# Altium footprint library PcbLib.PcbLib: 31 footprints (part 2 of 2)
Each footprint in its own frame and in the unit in brackets; x right, y up, seen from the top. Pads: shape width x height; smd on the part's side, far side on the other; paste and mask are expansions set on the pad; w line width, h text height; cw(c..) or ccw(c..) is an arc to the next point about the centre after c.
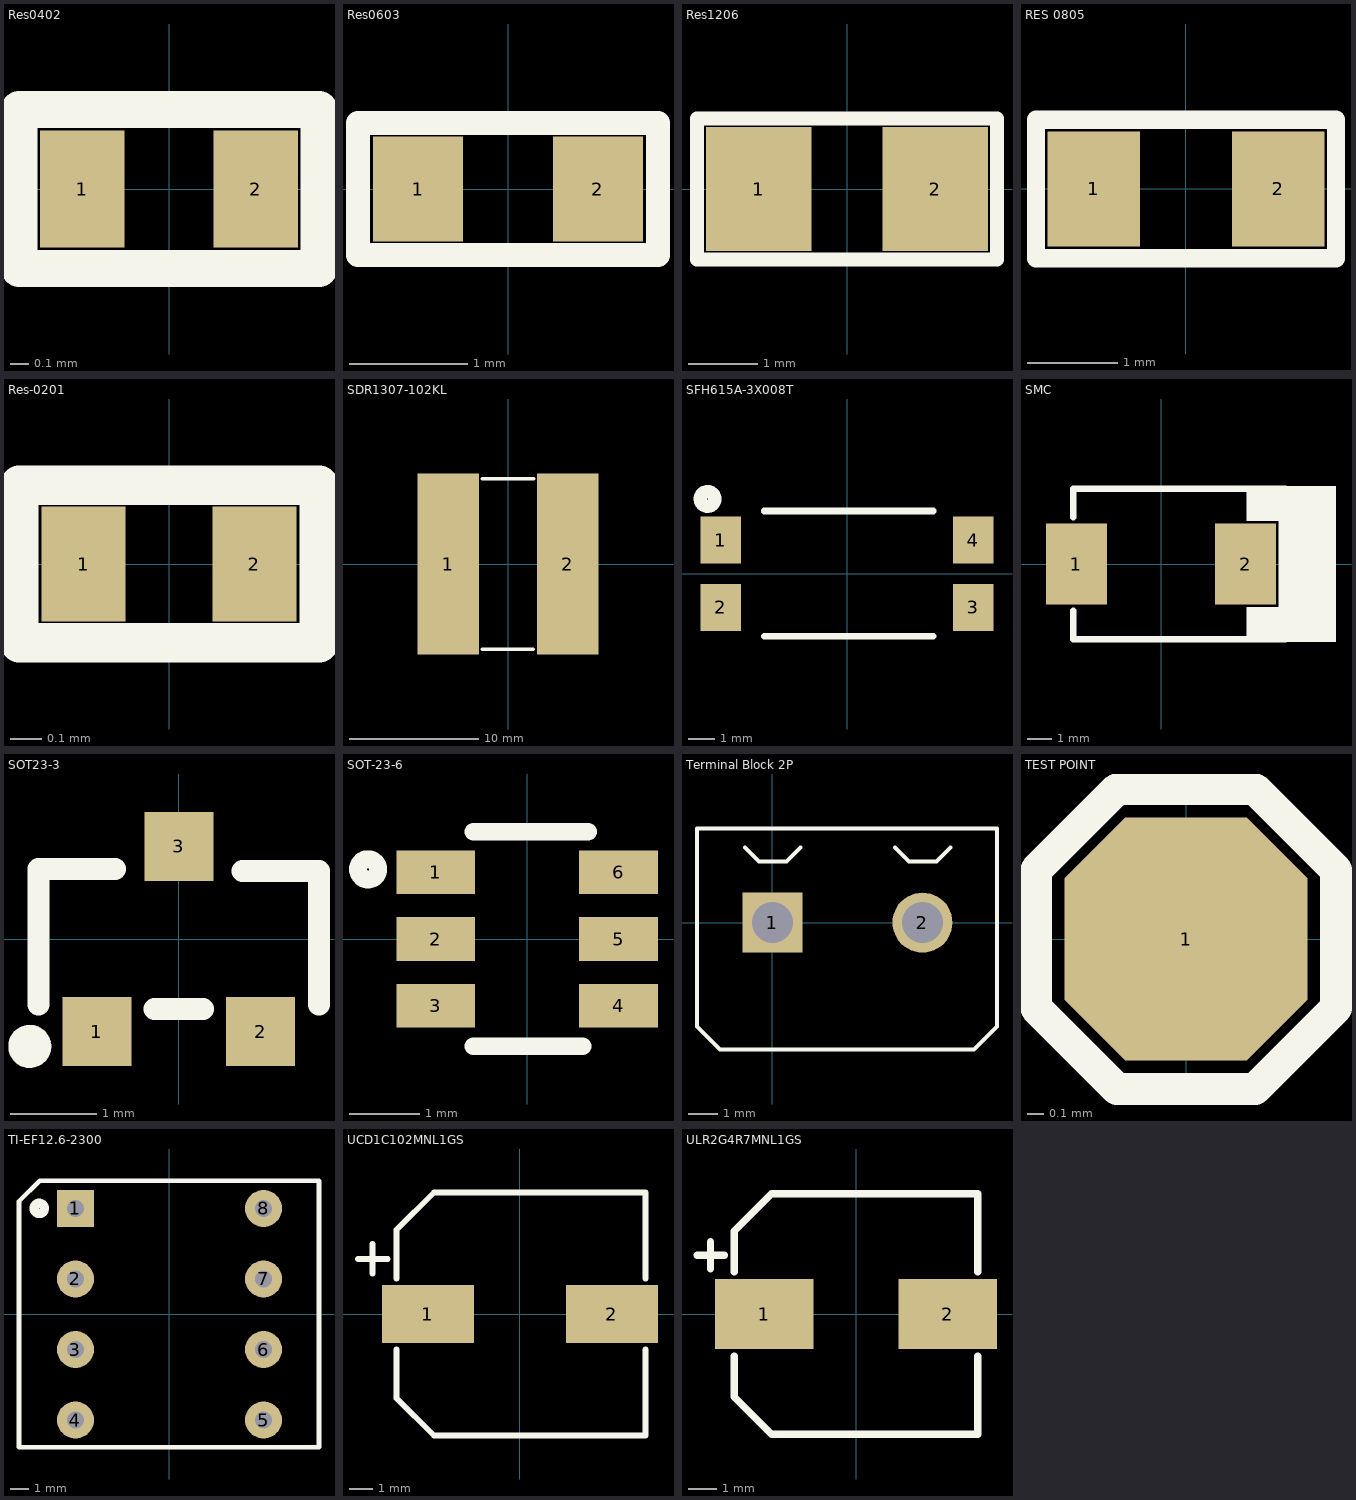
[diagram p1: the footprints below, top view; thin cyan lines are the x and y axes]

## Res0402 [mil]
pads (2):
  rect 18x25 smd mask+4: 1(-18.5,0) 2(18.5,0)
Top Overlay:
  lines w7.87: -32,-17 -32,17 32,17 32,-17 -32,-17
3D body "User Library-RES_1005-0402.step": height 16.14, standoff 0, extent -22.63,-10.82 22.64,10.83

## Res0603 [mil]
pads (2):
  rect 30x35 smd: 1(-30,0) 2(30,0)
Top Overlay:
  lines w7.87: -50,-22 -50,22 50,22 50,-22 -50,-22
3D body "User Library-RESC1608X05N.step": height 17.76, standoff 0, extent -30.52,-16.74 30.51,16.73

## Res1206 [mil]
pads (2):
  rect 60x70 smd: 1(-50,0) 2(50,0)
Top Overlay:
  lines w7.87: -85,-40 -85,40 85,40 85,-40 -85,-40
3D body "User Library-1206 SMD Resistor.step": height 39.45, standoff 0, extent -62.99,-31.49 63,31.51

## RES 0805 [mil] "SMD 0805"
pads (2):
  rect 40x50 smd: 1(-40,0) 2(40,0)
Top Overlay:
  lines w7.87: -65,-30 65,-30 65,30 -65,30 -65,-30
3D body "User Library-CR2012-0805.STEP": height 23.62, standoff 0, extent -39.34,-24.75 39.4,24.46

## Res-0201 [mm]
pads (2):
  rect 0.27x0.37 smd: 1(-0.275,0) 2(0.275,0)
Top Overlay:
  lines w0.127: -0.483,-0.254 0.483,-0.254 0.483,0.254 -0.483,0.254 -0.483,-0.254
3D body "User Library-0201(0603M) Res.step": height 0.29, standoff -0.02, extent -0.305,-0.152 0.305,0.153

## SDR1307-102KL [mm]
pads (2):
  rect 4.75x14 smd: 1(-4.625,0) 2(4.625,0)
Top Overlay:
  lines w0.254: -2.007,-6.604 1.981,-6.604 ; -2.007,6.604 2.007,6.604
3D body "SDR1307.STP": height 7, standoff 0, extent -6.5,-6.5 6.5,6.5

## SFH615A-3X008T [mm]
pads (4):
  rect 1.52x1.78 smd: 1(-4.765,1.27) 2(-4.765,-1.27) 3(4.765,-1.27) 4(4.765,1.27)
Top Overlay:
  circle w0.5: c-5.258,2.819 r0.275
  lines w0.254: -3.124,-2.362 3.251,-2.362 ; -3.124,2.362 3.251,2.362
3D body "VOT8024AB-T3.STP--3DModel-STEP-1.STP": height 3.86, standoff 0, extent -5.08,-2.3 5.08,2.3

## SMC [mm]
pads (2):
  rect 2.5x3.3 smd: 1(-3.45,0) 2(3.45,0)
Top Overlay:
  rectangle: 3.48,-3.073 4.877,-1.753
  rectangle: 3.48,1.753 4.877,3.073
  rectangle: 4.801,-3.175 7.137,3.175
  lines w0.254: -3.581,-1.905 -3.581,-3.073 5.08,-3.073 ; -3.581,1.905 -3.581,3.073 5.08,3.073
3D body "User Library-DO-214AB-SMC.step": height 2.4, standoff -0.05, extent -3.9,-2.95 3.9,2.95

## SOT23-3 [mm] "SOT23, 3-Leads, Body 2.9x1.3mm, Pitch 0.95mm, Lead Span 2.3mm - Reverse Pinning, IPC High Density"
height 1.1
pads (3):
  rect 0.8x0.8 smd: 1(-0.95,-1.075) 2(0.95,-1.075) 3(0,1.075)
Top Overlay:
  circle w0.25: c-1.727,-1.245 r0.125
  lines w0.254: -1.626,-0.762 -1.626,0.813 -0.737,0.813 ; -0.28,-0.813 0.279,-0.813 ; 0.736,0.787 1.625,0.787 1.625,-0.762
3D body "CircuitWorks-SOT-23.step": height 1.05, standoff -0.05, extent -1.5,-1.25 1.5,1.25

## SOT-23-6 [mm] "IC BAT CHG LI-ION 1 CELL SOT23-6"
pads (6):
  rect 1.12x0.62 smd: 1(-1.3,0.95) 2(-1.3,0) 3(-1.3,-0.95) 4(1.3,-0.95) 5(1.3,0) 6(1.3,0.95)
Top Overlay:
  circle w0.254: c-2.261,0.991 r0.144
  lines w0.254: -0.762,-1.524 0.787,-1.524 ; -0.762,1.524 0.864,1.524
3D body "User Library-SOT23-6-2.step": height 1.44, standoff -0.01, extent -1.4,-1.45 1.4,1.45

## Terminal Block 2P [mil] "TERMINAL BLOCK 2POS 5.08MM SIDE"
pads (2):
  rect 80x80 hole 55: 1(0,0)
  round 80 hole 55: 2(200,0)
Top Overlay:
  lines w5: -36.61,100.2 -17.84,81.43 18.71,81.43 37.48,100.2 ; 163.39,100.2 182.16,81.43 218.71,81.43 237.48,100.2 ; -100.66,-138.4 -100.66,125.42 299.34,125.42 299.34,-138.4 268.61,-169.14 -69.92,-169.14 -100.66,-138.4
3D body "User Library-Terminal block 2 POS.STEP": height 393.7, standoff -120, extent -100.66,-169.85 299.34,125.42

## TEST POINT [mil]
pads (1):
  oct 60x60 smd: 1(0,0)
Top Overlay:
  lines w7.87: -17,-37 17,-37 ; -17,-37 -37,-17 -37,17 -17,37 ; -17,-37 17,-37 ; -17,37 17,37 ; -17,37 17,37 ; 17,-37 37,-17 37,17 17,37

## TI-EF12.6-2300 [mm]
pads (8):
  rect 2x2 hole 0.9: 1(-5.08,5.715)
  round 2 hole 0.9: 2(-5.08,1.905) 3(-5.08,-1.905) 4(-5.08,-5.715) 5(5.08,-5.715) 6(5.08,-1.905) 7(5.08,1.905) 8(5.08,5.715)
Top Overlay:
  circle w0.5: c-7.036,5.715 r0.279
  lines w0.254: -8.128,-7.188 8.077,-7.188 8.077,7.214 -7.01,7.214 -8.128,6.096 -8.128,-7.188
3D body "EF12.6-K-H-8P-SS_z阰+enie.STEP": height 11.35, standoff -3.45, extent -8,-7.1 8,7.1

## UCD1C102MNL1GS [mm]
pads (2):
  rect 4x2.5 smd: 1(-4,0) 2(4,0)
Top Overlay:
  lines w0.254: -7.036,2.388 -5.74,2.388 ; -6.401,1.753 -6.401,3.048 ; -5.359,-1.549 -5.359,-3.658 -3.734,-5.283 5.461,-5.283 5.461,-1.549 ; -5.359,1.549 -5.359,3.658 -3.734,5.283 5.461,5.283 5.461,1.549
3D body "CAP_UCD_10X13P5_NCH.step": height 14.05, standoff 0, extent -5.651,-5.156 5.651,5.156

## ULR2G4R7MNL1GS [mm]
pads (2):
  rect 3.5x2.5 smd: 1(-3.25,0) 2(3.25,0)
Top Overlay:
  lines w0.254: -5.639,2.083 -4.674,2.083 ; -5.156,1.6 -5.156,2.565 ; -4.318,-1.499 -4.318,-2.946 -2.997,-4.267 -0.61,-4.267 4.318,-4.267 4.318,-1.499 ; -4.318,1.499 -4.318,2.718 -4.318,2.946 -2.997,4.267 -0.61,4.267 4.318,4.267 4.318,1.499
3D body "U2-P_NCH.step": height 10.06, standoff 0, extent -4.445,-4.153 4.445,4.153